# Altium footprint library Regulator$.PcbLib: 106 footprints (part 4 of 7)
Each footprint in its own frame and in the unit in brackets; x right, y up, seen from the top. Pads: shape width x height; smd on the part's side, far side on the other; paste and mask are expansions set on the pad; w line width, h text height; cw(c..) or ccw(c..) is an arc to the next point about the centre after c.
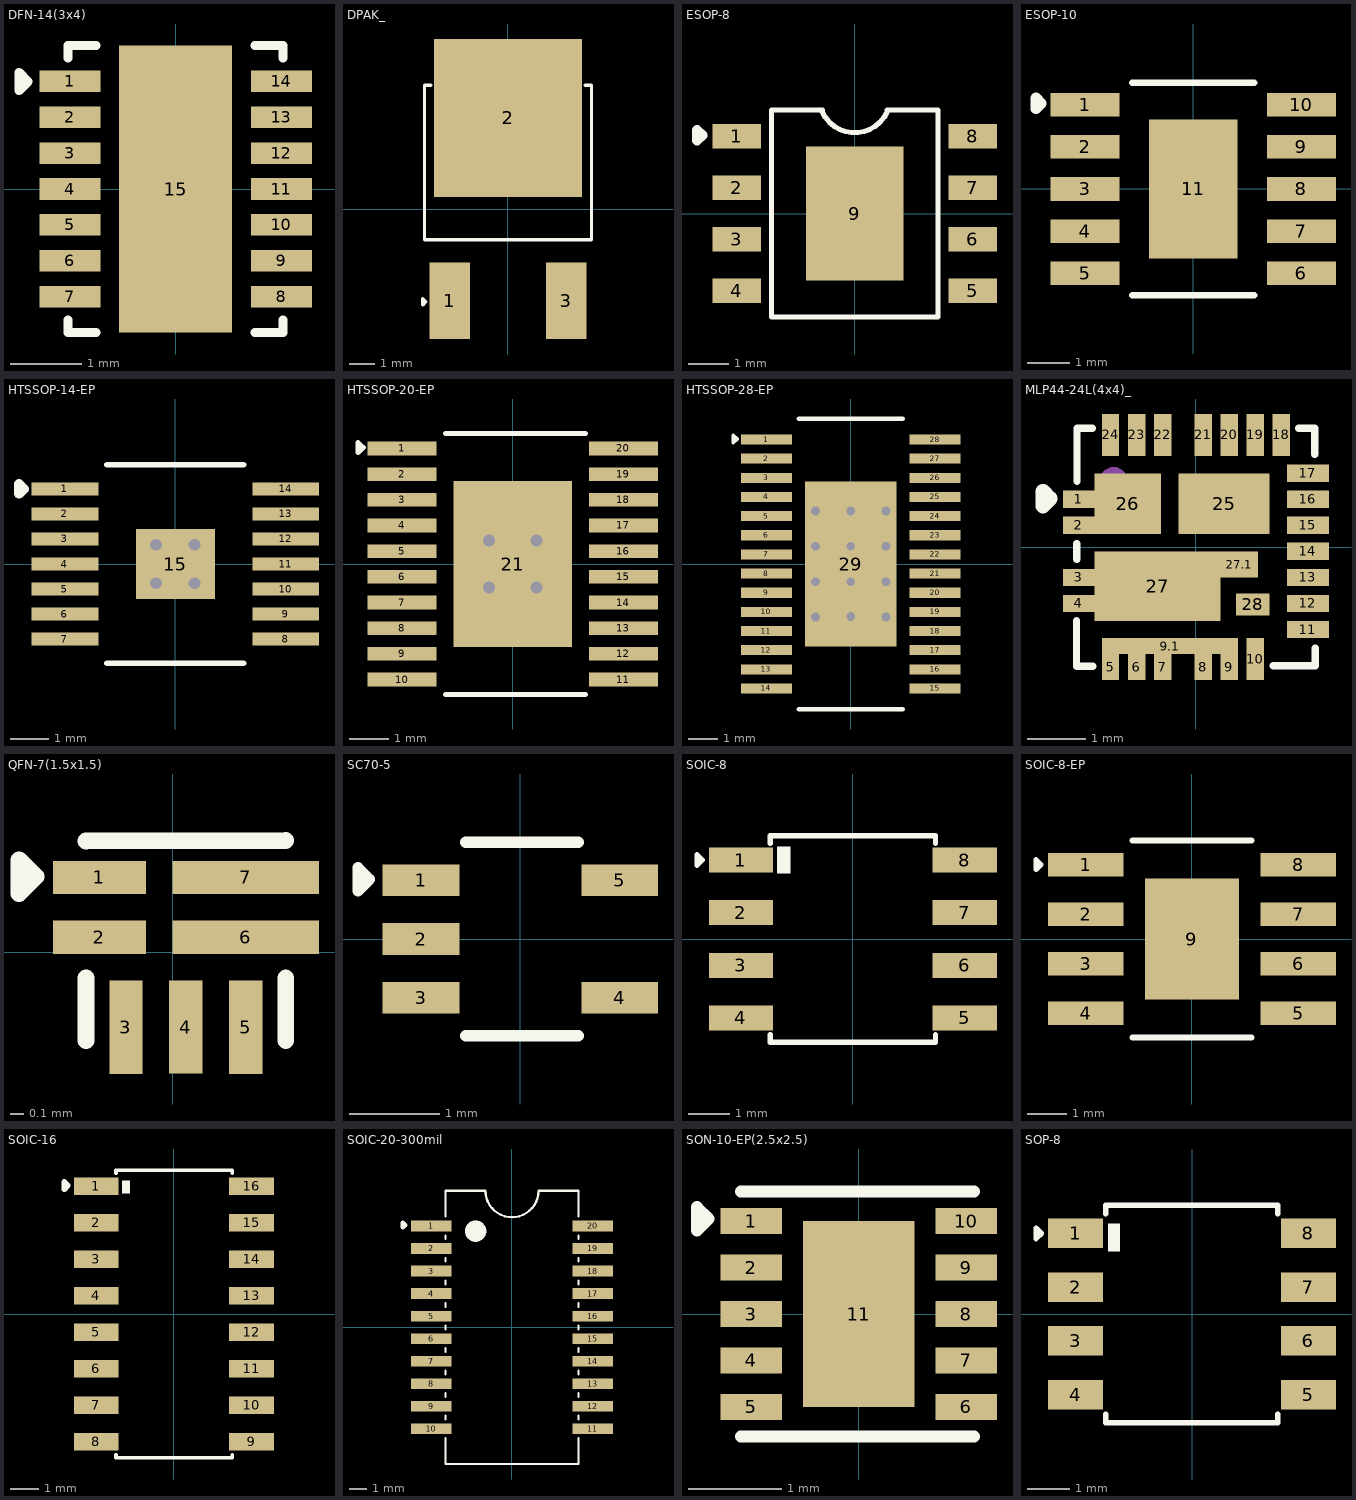
[diagram p3: the footprints below, top view; thin cyan lines are the x and y axes]

## DFN-14(3x4) [mm]
pads (15):
  rect 0.85x0.3 smd: 1(-1.475,1.5) 2(-1.475,1) 3(-1.475,0.5) 4(-1.475,0) 5(-1.475,-0.5) 6(-1.475,-1) 7(-1.475,-1.5) 8(1.475,-1.5) 9(1.475,-1) 10(1.475,-0.5) 11(1.475,0) 12(1.475,0.5) 13(1.475,1) 14(1.475,1.5)
  rect 1.58x4 smd paste-3: 15(0,0)
Top Overlay:
  lines w0.127: -1.5,-1.829 -1.5,-2 -1.11,-2 ; -1.5,1.829 -1.5,2 -1.11,2 ; 1.11,-2 1.5,-2 1.5,-1.829 ; 1.11,2 1.5,2 1.5,1.829 ; -2.184,1.372 -2.184,1.626 -2.057,1.499 -2.184,1.372
3D body "RT6154AGQW.STEP": height 0.7, standoff 0, extent -1.5,-2 1.5,2

## DPAK_ [mm]
pads (3):
  rect 1.6x3 smd: 1(-2.285,-3.59) 3(2.285,-3.59)
  rect 5.8x6.2 smd: 2(0,3.59)
Top Overlay:
  lines w0.127: -3.023,4.877 -3.277,4.877 -3.277,-1.194 3.277,-1.194 3.277,4.877 3.023,4.877 ; -3.353,-3.759 -3.226,-3.632 -3.353,-3.505 -3.353,-3.759
3D body "MC7805BDTRKG.STEP": height 2.51, standoff -0.01, extent -3.277,-3.988 3.223,5.918

## ESOP-8 [mm]
pads (9):
  rect 1.2x0.6 smd: 1(-2.908,1.905) 2(-2.908,0.635) 3(-2.908,-0.635) 4(-2.908,-1.905) 5(2.908,-1.905) 6(2.908,-0.635) 7(2.908,0.635) 8(2.908,1.905)
  rect 2.4x3.3 smd: 9(0,0)
Top Overlay:
  lines w0.127: -0.8,2.5 ccw(c0,2.875) 0.8,2.5 ; -0.8,2.55 -2.05,2.55 -2.05,-2.55 2.05,-2.55 2.05,2.55 0.8,2.55
  lines w0.254: -3.886,1.803 -3.886,2.057 -3.759,1.93 -3.886,1.803
3D body "User Library-SOIC-8-1.STEP": height 1.7, standoff -0.05, extent -3,-2.45 3,2.45

## ESOP-10 [mm]
pads (11):
  rect 1.64x0.56 smd paste+0 mask+0.051: 1(-2.57,2) 2(-2.57,1) 3(-2.57,0) 4(-2.57,-1) 5(-2.57,-2) 6(2.57,-2) 7(2.57,-1) 8(2.57,0) 9(2.57,1) 10(2.57,2)
  rect 2.1x3.3 smd paste+0 mask+0.051: 11(0,0)
Top Overlay:
  lines w0.152: -1.445,-2.526 1.445,-2.526 ; -1.445,2.526 1.445,2.526
  lines w0.254: -3.734,1.905 -3.607,2.032 -3.734,2.159 -3.734,1.905
3D body "C5464816.step": height 1.66, standoff 0, extent -3,-2.45 3,2.45

## HTSSOP-14-EP [mm]
pads (15):
  rect 1.731x0.343 smd paste+0 mask+0.051: 1(-2.866,1.95) 2(-2.866,1.3) 3(-2.866,0.65) 4(-2.866,0) 5(-2.866,-0.65) 6(-2.866,-1.3) 7(-2.866,-1.95) 8(2.866,-1.95) 9(2.866,-1.3) 10(2.866,-0.65) 11(2.866,0) 12(2.866,0.65) 13(2.866,1.3) 14(2.866,1.95)
  rect 2.055x1.83 smd paste+0 mask+0.051: 15(0,0)
via -0.5,-0.5 diameter 0.61 hole 0.305
via -0.5,0.5 diameter 0.61 hole 0.305
via 0.5,-0.5 diameter 0.61 hole 0.305
via 0.5,0.5 diameter 0.61 hole 0.305
Top Overlay:
  lines w0.152: -1.771,-2.576 1.772,-2.576 ; -1.771,2.576 1.772,2.576
  lines w0.254: -4.06,1.823 -3.933,1.95 -4.06,2.077 -4.06,1.823
3D body "C2867852.step": height 1.3, standoff 0, extent -3.196,-2.492 3.196,2.492

## HTSSOP-20-EP [mm]
pads (21):
  rect 1.747x0.343 smd paste+0 mask+0.051: 1(-2.8,2.925) 2(-2.8,2.275) 3(-2.8,1.625) 4(-2.8,0.975) 5(-2.8,0.325) 6(-2.8,-0.325) 7(-2.8,-0.975) 8(-2.8,-1.625) 9(-2.8,-2.275) 10(-2.8,-2.925) 11(2.8,-2.925) 12(2.8,-2.275) 13(2.8,-1.625) 14(2.8,-0.975) 15(2.8,-0.325) 16(2.8,0.325) 17(2.8,0.975) 18(2.8,1.625) 19(2.8,2.275) 20(2.8,2.925)
  rect 3x4.2 smd paste+0 mask+0.051: 21(0,0)
via -0.603,-0.6 diameter 0.61 hole 0.305
via -0.603,0.6 diameter 0.61 hole 0.305
via 0.597,0.6 diameter 0.61 hole 0.305
via 0.597,-0.6 diameter 0.61 hole 0.305
Top Overlay:
  lines w0.127: -1.698,-3.301 1.845,-3.301 ; -1.698,3.301 1.845,3.301 ; -3.912,2.819 -3.785,2.946 -3.912,3.073 -3.912,2.819
3D body "HT20.step": height 1.3, standoff 0, extent -3.196,-3.24 3.196,3.24

## HTSSOP-28-EP [mm]
pads (29):
  rect 1.731x0.343 smd paste+0 mask+0.051: 1(-2.866,4.225) 2(-2.866,3.575) 3(-2.866,2.925) 4(-2.866,2.275) 5(-2.866,1.625) 6(-2.866,0.975) 7(-2.866,0.325) 8(-2.866,-0.325) 9(-2.866,-0.975) 10(-2.866,-1.625) 11(-2.866,-2.275) 12(-2.866,-2.925) 13(-2.866,-3.575) 14(-2.866,-4.225) 15(2.866,-4.225) 16(2.866,-3.575) 17(2.866,-2.925) 18(2.866,-2.275) 19(2.866,-1.625) 20(2.866,-0.975) 21(2.866,-0.325) 22(2.866,0.325) 23(2.866,0.975) 24(2.866,1.625) 25(2.866,2.275) 26(2.866,2.925) 27(2.866,3.575) 28(2.866,4.225)
  rect 3.1x5.6 smd paste+0 mask+0.05: 29(0,0)
via 1.2,-1.8 diameter 0.5 hole 0.3
via 1.2,-0.6 diameter 0.5 hole 0.3
via 0,-1.778 diameter 0.5 hole 0.3
via 0,-0.6 diameter 0.5 hole 0.3
via 1.2,1.8 diameter 0.5 hole 0.3
via 0,1.8 diameter 0.5 hole 0.3
via -1.2,1.8 diameter 0.5 hole 0.3
via 1.2,0.6 diameter 0.5 hole 0.3
via -1.2,0.6 diameter 0.5 hole 0.3
via -1.2,-0.6 diameter 0.5 hole 0.3
via 0,0.6 diameter 0.5 hole 0.3
via -1.2,-1.8 diameter 0.5 hole 0.3
Top Overlay:
  lines w0.127: -3.988,4.115 -3.861,4.242 -3.988,4.369 -3.988,4.115
  lines w0.152: -1.771,-4.926 1.772,-4.926 ; -1.771,4.926 1.772,4.926
3D body "C2860809.step": height 1.2, standoff 0, extent -3.2,-4.85 3.2,4.85

## MLP44-24L(4x4)_ [mm]
pads (30):
  rect 0.55x0.3 smd: 1(-2.025,0.825) 2(-2.025,0.375) 3(-2.025,-0.525) 4(-2.025,-0.975)
  rect 0.3x0.45 smd: 5(-1.475,-2.075) 6(-1.025,-2.075) 7(-0.575,-2.075) 8(0.125,-2.075) 9(0.575,-2.075)
  rect 2.35x0.28 smd: 9.1(-0.45,-1.71)
  rect 0.3x0.73 smd: 10(1.025,-1.935)
  rect 0.725x0.3 smd: 11(1.937,-1.425) 12(1.937,-0.975) 13(1.937,-0.525) 14(1.937,-0.075) 15(1.937,0.375) 16(1.937,0.825) 17(1.937,1.275)
  rect 0.3x0.725 smd: 18(1.475,1.937) 19(1.025,1.937) 20(0.575,1.937) 21(0.125,1.937) 22(-0.575,1.937) 23(-1.025,1.937) 24(-1.475,1.937)
  rect 1.575x1.05 smd: 25(0.487,0.75)
  rect 1.15x1.05 smd: 26(-1.175,0.75)
  rect 2.175x1.2 smd: 27(-0.663,-0.675)
  rect 0.65x0.455 smd: 27.1(0.75,-0.302)
  rect 0.58x0.38 smd: 28(0.985,-0.99)
Top Overlay:
  lines w0.127: -2.063,-1.27 -2.063,-2.059 -1.782,-2.059 ; -2.06,-0.208 -2.06,0.057 ; -2.054,1.138 -2.054,2.055 -1.791,2.055 ; 1.332,-2.05 2.063,-2.05 2.063,-1.748 ; 1.778,2.052 2.056,2.052 2.056,1.602
  lines w0.254: -2.642,0.711 -2.642,0.965 -2.515,0.838 -2.642,0.711
Mechanical 13:
  circle w0.24: c-1.424,1.143 r0.12
3D body "step_temp.STEP": height 0.8, standoff 0, extent -2,-2 2,2

## QFN-7(1.5x1.5) [mm]
pads (7):
  rect 0.7x0.25 smd paste+0 mask+0.05: 1(-0.55,0.563) 2(-0.55,0.113)
  rect 0.25x0.7 smd paste+0 mask+0.05: 3(-0.35,-0.563) 4(0.1,-0.562) 5(0.55,-0.562)
  rect 1.1x0.25 smd paste+0 mask+0.05: 6(0.55,0.113) 7(0.55,0.563)
Top Overlay:
  lines w0.127: -0.65,-0.662 -0.65,-0.192 ; -0.65,0.838 0.85,0.841 ; 0.85,-0.662 0.85,-0.192 ; -1.154,0.441 -1.027,0.568 -1.154,0.695 -1.154,0.441
3D body "C3151906.step": height 0.56, standoff 0, extent -0.65,-0.668 0.85,0.832

## SC70-5 [mm]
pads (5):
  rect 0.85x0.35 smd: 1(-1.1,0.65) 2(-1.1,0) 3(-1.1,-0.65) 4(1.1,-0.65) 5(1.1,0.65)
Top Overlay:
  lines w0.127: -0.606,-1.07 0.644,-1.07 ; -0.606,1.07 0.644,1.07 ; -1.798,0.533 -1.798,0.787 -1.671,0.66 -1.798,0.533
3D body "SN74LVC1G08DCKR.step": height 1.1, standoff 0, extent -1.05,-1 1.05,1

## SOIC-8 [mm]
pads (8):
  rect 1.55x0.6 smd: 1(-2.7,1.905) 2(-2.7,0.635) 3(-2.7,-0.635) 4(-2.7,-1.905) 5(2.7,-1.905) 6(2.7,-0.635) 7(2.7,0.635) 8(2.7,1.905)
Top Overlay:
  rectangle: -1.829,1.575 -1.499,2.235
  lines w0.127: -1.991,-2.311 -1.991,-2.489 1.991,-2.489 1.991,-2.311 ; -1.991,2.311 -1.991,2.489 1.991,2.489 1.991,2.311 ; -3.759,1.778 -3.759,2.032 -3.632,1.905 -3.759,1.778
3D body "User Library-SOIC-8-1.STEP": height 1.7, standoff -0.05, extent -3,-2.45 3,2.45

## SOIC-8-EP [mm]
pads (9):
  rect 1.941x0.602 smd: 1(-2.721,1.905) 2(-2.721,0.635) 3(-2.721,-0.635) 4(-2.721,-1.905) 5(2.721,-1.905) 6(2.721,-0.635) 7(2.721,0.635) 8(2.721,1.905)
  rect 2.41x3.098 smd: 9(0,0)
Top Overlay:
  lines w0.127: -3.997,1.778 -3.997,2.032 -3.87,1.905 -3.997,1.778
  lines w0.152: -1.521,-2.526 1.521,-2.526 ; -1.521,2.526 1.521,2.526
3D body "C140293.step": height 1.72, standoff 0, extent -3,-2.408 3,2.407

## SOIC-16 [mm]
pads (16):
  rect 1.55x0.6 smd: 1(-2.7,4.445) 2(-2.7,3.175) 3(-2.7,1.905) 4(-2.7,0.635) 5(-2.7,-0.635) 6(-2.7,-1.905) 7(-2.7,-3.175) 8(-2.7,-4.445) 9(2.7,-4.445) 10(2.7,-3.175) 11(2.7,-1.905) 12(2.7,-0.635) 13(2.7,0.635) 14(2.7,1.905) 15(2.7,3.175) 16(2.7,4.445)
Top Overlay:
  rectangle: -1.811,4.191 -1.532,4.648
  lines w0.127: -2.014,-4.902 -2.014,-5.004 2.024,-5.004 ; -2.014,4.902 -2.014,5.004 2.024,5.004 ; 2.029,-5.002 2.029,-4.902 ; 2.029,4.902 2.029,5.002
  lines w0.2: -3.818,4.343 -3.818,4.597 -3.691,4.47 -3.818,4.343
3D body "MAX14850ASE+.STEP": height 1.75, standoff 0, extent -3,-4.95 3,4.95

## SOIC-20-300mil [mm]
pads (20):
  rect 2.3x0.6 smd: 1(-4.55,5.715) 2(-4.55,4.445) 3(-4.55,3.175) 4(-4.55,1.905) 5(-4.55,0.635) 6(-4.55,-0.635) 7(-4.55,-1.905) 8(-4.55,-3.175) 9(-4.55,-4.445) 10(-4.55,-5.715) 11(4.55,-5.715) 12(4.55,-4.445) 13(4.55,-3.175) 14(4.55,-1.905) 15(4.55,-0.635) 16(4.55,0.635) 17(4.55,1.905) 18(4.55,3.175) 19(4.55,4.445) 20(4.55,5.715)
Top Overlay:
  lines w0.127: -3.75,-6.246 -3.75,-7.7 3.75,-7.7 3.75,-6.246 ; -3.75,-5.184 -3.75,-4.976 ; -3.75,-3.914 -3.75,-3.706 ; -3.75,-2.644 -3.75,-2.436 ; -3.75,-1.374 -3.75,-1.166 ; -3.75,-0.104 -3.75,0.104 ; -3.75,1.166 -3.75,1.374 ; -3.75,2.436 -3.75,2.644 ; -3.75,3.706 -3.75,3.914 ; -3.75,4.976 -3.75,5.184 ; -3.75,6.246 -3.75,7.7 -1.5,7.7 ; -1.501,7.701 ccw(c0,7.707) 1.5,7.7 3.75,7.7 3.75,6.246 ; 3.75,-5.184 3.75,-4.976 ; 3.75,-3.914 3.75,-3.706 ; 3.75,-2.644 3.75,-2.436 ; 3.75,-1.374 3.75,-1.166 ; 3.75,-0.104 3.75,0.104 ; 3.75,1.166 3.75,1.374 ; 3.75,2.436 3.75,2.644 ; 3.75,3.706 3.75,3.914 ; 3.75,4.976 3.75,5.184
  lines w0.254: -6.15,5.639 -6.023,5.766 -6.15,5.893 -6.15,5.639
  lines w0.6: -1.75,5.42 cw(c-2.05,5.423) -2.35,5.423 cw(c-2.05,5.423) -1.75,5.426
3D body "ADUM4151BRIZ.STEP": height 1.04, standoff -1.6, extent -5.155,-7.65 5.155,7.65

## SON-10-EP(2.5x2.5) [mm]
pads (11):
  rect 0.665x0.28 smd paste+0 mask+0.051: 1(-1.157,1) 2(-1.157,0.5) 3(-1.157,0) 4(-1.157,-0.5) 5(-1.157,-1) 6(1.157,-1) 7(1.157,-0.5) 8(1.157,0) 9(1.157,0.5) 10(1.157,1)
  rect 1.2x2 smd paste+0 mask+0.051: 11(0,0)
Top Overlay:
  lines w0.127: -1.27,-1.321 1.245,-1.321 ; -1.27,1.321 1.245,1.321 ; -1.742,0.898 -1.615,1.025 -1.742,1.152 -1.742,0.898
3D body "TPS63030DSKR.step": height 0.8, standoff 0, extent -1.25,-1.25 1.25,1.25

## SOP-8 [mm]
pads (8):
  rect 1.3x0.7 smd: 1(-2.75,1.905) 2(-2.75,0.635) 3(-2.75,-0.635) 4(-2.75,-1.905) 5(2.75,-1.905) 6(2.75,-0.635) 7(2.75,0.635) 8(2.75,1.905)
Top Overlay:
  rectangle: -1.981,1.473 -1.702,2.134
  lines w0.127: -2.036,-2.362 -2.036,-2.565 2.028,-2.565 2.028,-2.362 ; -2.036,2.362 -2.036,2.565 2.028,2.565 2.028,2.362 ; -3.687,1.778 -3.56,1.905 -3.687,2.032 -3.687,1.778
3D body "TRANS_IRF7103TRPBF_INF.step": height 1.76, standoff 0, extent -3.099,-2.502 3.099,2.502